# Altium footprint library IC.PcbLib: 204 footprints (part 11 of 13)
Each footprint in its own frame and in the unit in brackets; x right, y up, seen from the top. Pads: shape width x height; smd on the part's side, far side on the other; paste and mask are expansions set on the pad; w line width, h text height; cw(c..) or ccw(c..) is an arc to the next point about the centre after c.
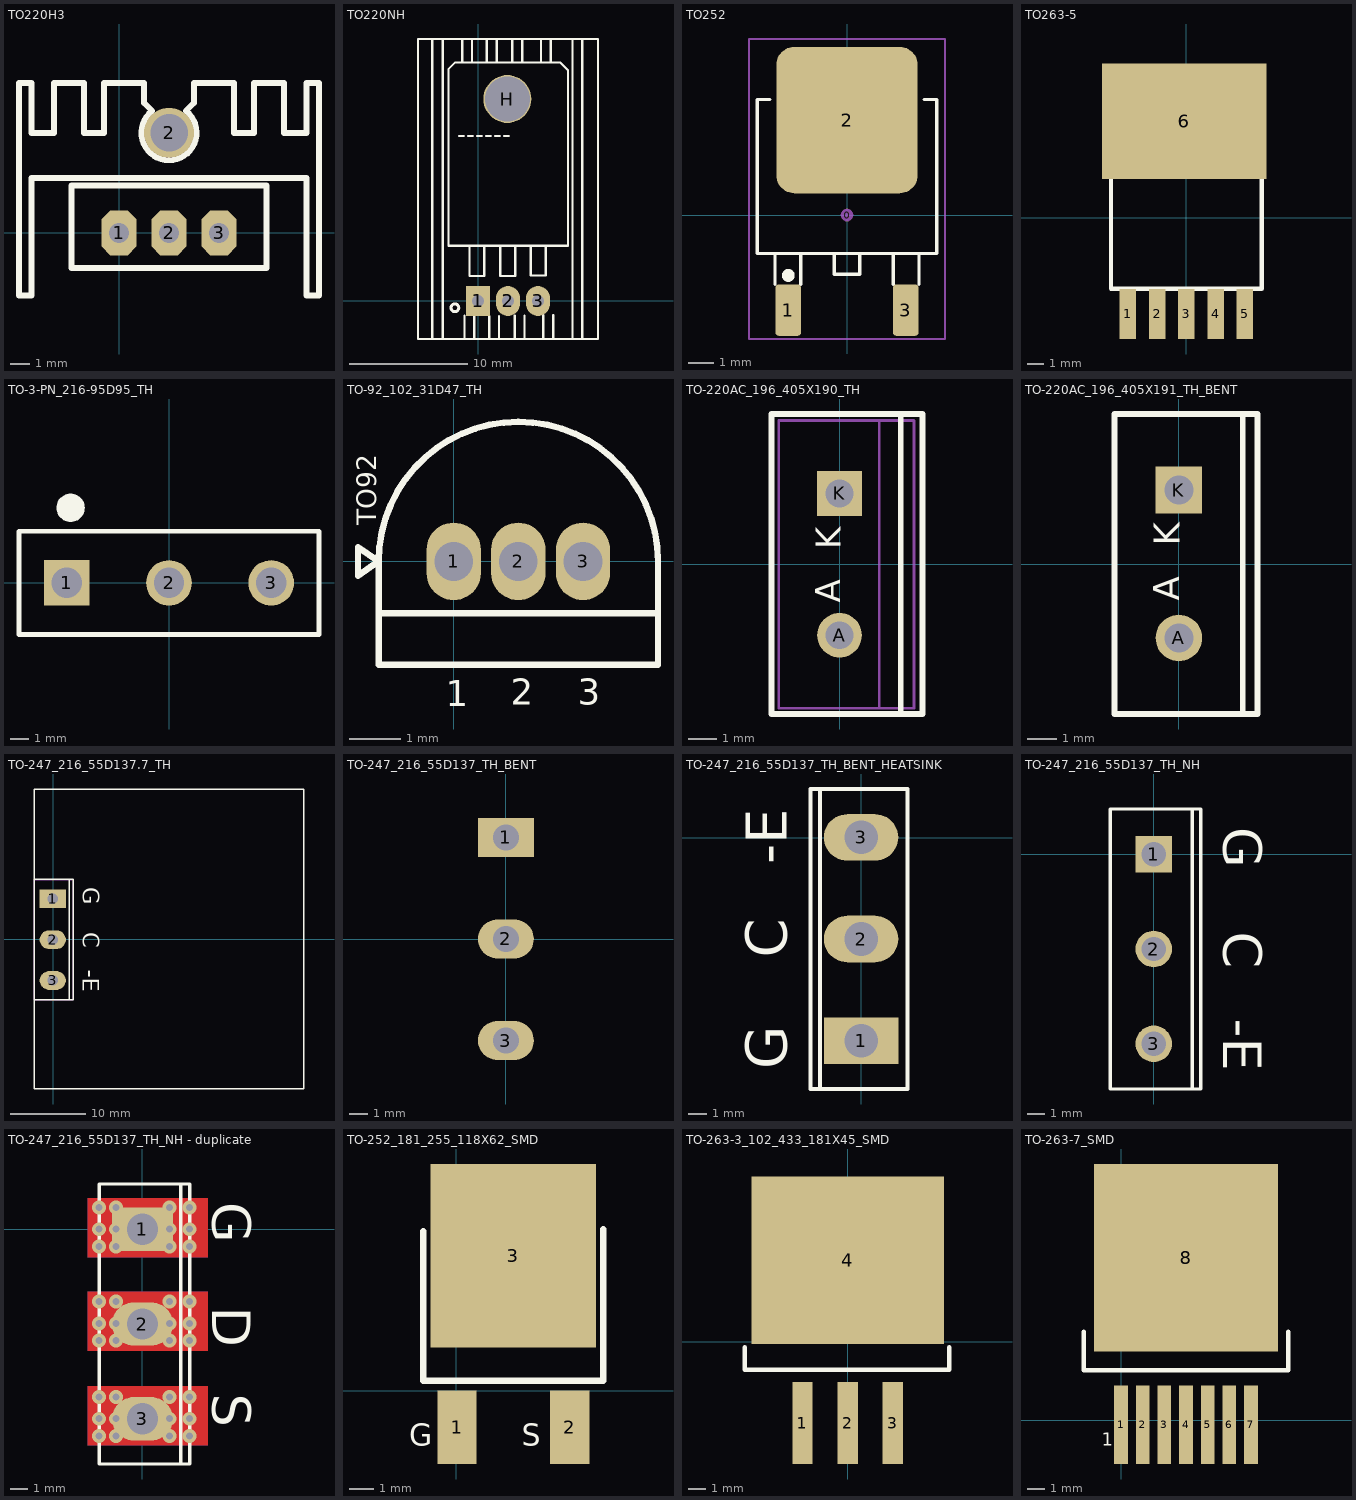
[diagram p10: the footprints below, top view; thin cyan lines are the x and y axes]

## TO220H3 [mil] "TO-220 1-2-3"
pads (4):
  oct 70x90 hole 40: 1(0,0) 2(100,0) 3(200,0)
  round 100 hole 75: 2(100,200)
Top Overlay:
  lines w12: 66,244 50,260 50,300 -30,300 -30,200 -70,200 -70,300 -130,300 -130,200 -175,200 -175,300 -200,300 -200,-125 -175,-125 -175,110 375,110 375,-125 400,-125 400,300 375,300 375,200 330,200 330,300 270,300 270,200 230,200 230,300 150,300 150,260 133.59,243.59 ; 66.37,243.52 ccw(c100,200) 133.77,243.41 ; -95,-70 -95,95 295,95 295,-70 -95,-70
3D body "SW3dPS-heatsink TO126.STEP": height 984.25, standoff -149.61, extent -189.97,-102.25 391.97,323
3D body "User Library-TO-220-1.STEP": height 322.83, standoff -810.24, extent -96.88,-76.17 292.88,101

## TO220NH [mil] "TO-220 - 1-2-3"
height 200
pads (4):
  rect 80x100 hole 39: 1(0,0)
  oval 80x100 hole 39: 2(100,0) 3(200,0)
  round 160 hole 150: H(98,673)
Top Overlay:
  circle w10: c-77.03,-23 r12.97
  lines w7: -99,549 -99,772 -77,794 275,794 300,769 300,730 ; -99,552 -99,184 300,184 300,553 ; -29,178 -29,83 21,83 21,180 20,181 ; 74,178 74,83 124,83 124,180 123,181 ; 176,180 176,85 226,85 226,182 225,183 ; 300,552 300,733
  lines w8: -152,-127 -152,873 ; -117,-127 -117,873 ; -53,796 -53.01,869.97 ; -45,-124 -45.01,-50.03 ; -20,796 -20.01,869.97 ; -12,-124 -12.01,-50.03 ; 29,795 28.99,868.97 ; 37,-125 36.99,-51.03 ; 62,795 61.99,868.97 ; 70,-125 69.99,-51.03 ; 114,796 113.99,869.97 ; 122,-124 121.99,-50.03 ; 147,796 146.99,869.97 ; 155,-124 154.99,-50.03 ; 210,798 209.99,871.97 ; 218,-122 217.99,-48.03 ; 243,798 242.99,871.97 ; 251,-122 250.99,-48.03 ; 315,-127 315,873 ; 348,-127 348,873 ; -200,-127 -200,873 400,873 400,-127 -200,-127
  text "------" at -69,527 h60
3D body "SW3DPS-TO-220-DEFAULT.STEP": height 165.35, standoff -118.11, extent -100,-3.66 300,763.66

## TO252 [mm] "TO252"
pads (4):
  round 0.5 on Mech15: 0(0,0)
  rrect25% 1x2 smd: 1(-2.285,-3.7) 3(2.285,-3.7)
  rrect25% 5.5x5.7 smd: 2(0,3.7)
Top Overlay:
  circle w0.25: c-2.285,-2.35 r0.125
  lines w0.127: -3,4.5 -3.5,4.5 -3.5,-1.5 3.5,-1.5 3.5,4.5 3,4.5 ; -2.8,-2.7 -2.8,-1.5 -1.8,-1.5 -1.8,-2.7 ; 1.8,-2.7 1.8,-1.5 2.8,-1.5 2.8,-2.7 ; -0.5,-2.3 -0.5,-1.5 0.5,-1.5 0.5,-2.3 -0.5,-2.3
Mechanical 15:
  lines w0.076: -3.81,-4.826 -3.81,6.858 3.81,6.858 3.81,-4.826 -3.81,-4.826
3D body "DPAK.stp": height 2.31, standoff 0, extent -3.3,-3.951 3.3,5.762

## TO263-5 [mil] "TO263-5"
pads (6):
  rect 39.37x120 smd: 1(-140,-230) 2(-70,-230) 3(0,-230) 4(70,-230) 5(140,-230)
  rect 393.7x275.59 smd: 6(-5,230)
Top Overlay:
  lines w10: -160,170 -160,240 -140,260 140,260 160,240 160,170 ; -180,-170 180,-170 180,170 -180,170 -180,-170
3D body "TO-263-5.STEP": height 180.12, standoff 0.6, extent -200,-241.79 200,309.98

## TO-3-PN_216-95D95_TH [mm] "CASE: TO-3"
height 23.8
pads (4):
  rect 2.43x2.43 hole 1.62: 1(-5.45,0)
  round 2.43 hole 1.62: 2(0,0) 3(5.45,0)
  round 1.524 on Top Overlay: ""(-5.25,4)
Top Overlay:
  lines w0.254: -8,-2.75 8,-2.75 8,2.75 -8,2.75 -8,-2.75
3D body "FGA60N65SMD.stp": height 23.4, standoff -37.4, extent -7.8,-2.5 7.8,2.5

## TO-92_102_31D47_TH [mil] "CASE: TH"
height 342.52
pads (3):
  oval 42x60 hole 30 mask+3: 1(0,0) 2(50,0) 3(100,0)
Top Overlay:
  lines w5: -58,-40 158,-40 ; -58,0 cw(c50,0) 158,0 158,-80 -58,-80 -58,0 ; -58,0 -74,-11 -74,11 -58,0
  text "1" at -6,-112 h20
  text "2" at 44,-111 h20
  text "3" at 96,-111 h20
  text "TO92" at -60,28 h15
3D body "TO-92-2.STEP": height 418.5, standoff -140.55, extent -44.37,-63.73 144.39,93.75

## TO-220AC_196_405X190_TH [mm] "FM, 2-Leads, Body 10.3x4.85mm, Pitch 5.08mm"
height 19.05
pads (2):
  round 1.6 hole 1: A(0,-2.54)
  rect 1.6x1.6 hole 1: K(0,2.54)
Top Overlay:
  lines w0.2: 2.184,-5.258 2.195,5.334 ; -2.438,-5.359 2.972,-5.359 2.972,5.385 -2.438,5.385 -2.438,-5.359
  text "A" at 0.33,-1.372 h1.52
  text "K" at 0.356,0.533 h1.52
Mechanical 8:
  lines w0.1: 1.42,-5.15 1.42,5.15 ; -2.18,-5.15 2.67,-5.15 2.67,5.15 -2.18,5.15 -2.18,-5.15
3D body: height 14.33, standoff 12.8, extent 1.42,-4.975 2.67,4.975
3D body: height 19.05, standoff 18.18, extent 1.42,-4.975 2.67,4.975
3D body: height 14.37, standoff 14.33, extent 1.42,-4.975 2.67,-0.376
3D body: height 18.18, standoff 18.14, extent 1.42,-4.975 2.67,-0.376
3D body: height 14.48, standoff 14.36, extent 1.42,-4.975 2.67,-0.737
3D body: height 18.14, standoff 18.03, extent 1.42,-4.975 2.67,-0.737
3D body: height 2.79, standoff 0, extent -0.25,1.875 0.25,3.205
3D body: height 14.37, standoff 14.33, extent 1.42,0.376 2.67,4.975
3D body: height 18.18, standoff 18.14, extent 1.42,0.376 2.67,4.975
3D body: height 14.48, standoff 14.36, extent 1.42,0.737 2.67,4.975
3D body: height 18.14, standoff 18.03, extent 1.42,0.737 2.67,4.975
3D body: height 14.65, standoff 14.47, extent 1.42,1.069 2.67,4.975
3D body: height 18.03, standoff 17.85, extent 1.42,1.069 2.67,4.975
3D body: height 14.89, standoff 14.65, extent 1.42,1.361 2.67,4.975
3D body: height 17.86, standoff 17.61, extent 1.42,1.361 2.67,4.975
3D body: height 15.19, standoff 14.89, extent 1.42,1.601 2.67,4.975
3D body: height 17.62, standoff 17.32, extent 1.42,1.601 2.67,4.975
3D body: height 15.52, standoff 15.18, extent 1.42,1.778 2.67,4.975
3D body: height 17.32, standoff 16.99, extent 1.42,1.778 2.67,4.975
3D body: height 15.88, standoff 15.51, extent 1.42,1.888 2.67,4.975
3D body: height 16.99, standoff 16.63, extent 1.42,1.888 2.67,4.975
3D body: height 16.25, standoff 15.87, extent 1.42,1.925 2.67,4.975
3D body: height 16.63, standoff 16.25, extent 1.42,1.925 2.67,4.975
3D body: height 2.79, standoff 0, extent -0.25,-3.205 0.25,-1.875
3D body: height 14.65, standoff 14.47, extent 1.42,-4.975 2.67,-1.069
3D body: height 18.03, standoff 17.85, extent 1.42,-4.975 2.67,-1.069
3D body: height 14.89, standoff 14.65, extent 1.42,-4.975 2.67,-1.361
3D body: height 17.86, standoff 17.61, extent 1.42,-4.975 2.67,-1.361
3D body: height 15.19, standoff 14.89, extent 1.42,-4.975 2.67,-1.601
3D body: height 17.62, standoff 17.32, extent 1.42,-4.975 2.67,-1.601
3D body: height 15.52, standoff 15.18, extent 1.42,-4.975 2.67,-1.778
3D body: height 17.32, standoff 16.99, extent 1.42,-4.975 2.67,-1.778
3D body: height 15.88, standoff 15.51, extent 1.42,-4.975 2.67,-1.888
3D body: height 16.99, standoff 16.63, extent 1.42,-4.975 2.67,-1.888
3D body: height 16.25, standoff 15.87, extent 1.42,-4.975 2.67,-1.925
3D body: height 16.63, standoff 16.25, extent 1.42,-4.975 2.67,-1.925
3D body: height 0, standoff -1.6, extent -0.25,2.155 0.25,2.925
3D body: height 0, standoff -1.6, extent -0.25,-2.925 0.25,-2.155
3D body: height 12.8, standoff 2.79, extent -2.18,-5.15 2.67,5.15

## TO-220AC_196_405X191_TH_BENT [mm]
pads (2):
  round 1.6 hole 1: A(0,-2.54)
  rect 1.6x1.6 hole 1: K(0,2.54)
Top Overlay:
  lines w0.2: 2.195,-5.15 2.195,5.15 ; -2.205,-5.15 2.695,-5.15 2.695,5.15 -2.205,5.15 -2.205,-5.15
  text "K" at 0.33,0.635 h1.52
  text "A" at 0.305,-1.27 h1.52
3D body "User Library-TO220 L.step": height 7.2, standoff -0.3, extent -0.052,-4.9 19.652,5.1

## TO-247_216_55D137.7_TH [mm]
pads (3):
  rect 3.5x2.5 hole 1.4: 1(-0.076,5.425)
  oval 3.5x2.5 hole 1.4: 2(-0.076,-0.025) 3(-0.076,-5.475)
Top Overlay:
  lines w0.178: 2.134,-8.075 2.134,8.025 ; 33.426,20.091 -2.566,20.091 -2.566,8.025 ; 33.452,20.091 33.452,-19.964 -2.565,-19.964 -2.565,-8.076 -2.566,-8.075 ; -2.566,-8.075 -2.566,8.025 ; -2.566,-8.075 2.634,-8.075 2.634,8.025 -2.566,8.025
  text "G" at 3.924,6.975 h2.2
  text "C" at 3.924,0.975 h2.2
  text "-E" at 3.924,-4.025 h2.2
Mechanical 13:
  lines w0.1: 2.634,-8.05 2.634,8 ; 2.634,-8.05 -2.566,-8.05 -2.566,8 2.634,8 ; 2.634,-8.05 2.634,8
3D body "tony_assembly_14_asm.stp": height 52, standoff -2.2, extent -2.591,-19.949 33.57,20.051

## TO-247_216_55D137_TH_BENT [mm] "IGBT"
height 12
pads (3):
  rect 3x2.1 hole 1.4: 1(0,5.45)
  oval 3x2.1 hole 1.4: 2(0,0) 3(0,-5.45)
Bottom Overlay:
  lines w0.2: 2.21,-8.05 2.21,8.05 ; -2.49,-8.05 -2.49,8.05 2.71,8.05 2.71,-8.05 -2.49,-8.05
  text "E" at -5.5,-8 h2.2
  text "G" at -5.5,5 h2.2
  text "C" at -5.5,-0.5 h2.2
3D body "IGBT.STEP": height -5, standoff -9.9, extent 3.9,-7.75 23.9,7.75

## TO-247_216_55D137_TH_BENT_HEATSINK [mm] "CASE: TO-247"
height 30
pads (3):
  rect 4x2.5 hole 1.8: 1(0,-10.871)
  oval 4x2.5 hole 1.8: 2(0,-5.421) 3(0,0.029)
Top Overlay:
  lines w0.2: -2.21,-13.471 -2.21,2.629 ; -2.71,-13.471 -2.71,2.629 2.49,2.629 2.49,-13.471 -2.71,-13.471
  text "G" at -4,-12.421 h2.2
  text "C" at -4,-6.421 h2.2
  text "-E" at -4,-1.421 h2.2
3D body "IGBT and Heatsink.STEP": height 18.01, standoff -3.99, extent -7.173,-25.461 32.827,14.539

## TO-247_216_55D137_TH_NH [mm]
pads (3):
  rect 2.1x2.1 hole 1.4: 1(0,0)
  round 2.1 hole 1.4: 2(0,-5.45) 3(0,-10.9)
Top Overlay:
  lines w0.2: 2.21,-13.5 2.21,2.6 ; -2.49,-13.5 2.71,-13.5 2.71,2.6 -2.49,2.6 -2.49,-13.5
  text "-E" at 4,-9.45 h2.2
  text "C" at 4,-4.45 h2.2
  text "G" at 4,1.55 h2.2
3D body: height 25.57, standoff 4.17, extent -2.49,-13.475 2.71,2.575

## TO-247_216_55D137_TH_NH - duplicate [mm] "Power Mosfet"
height 24.78
pads (3):
  rect 3.5x2.5 hole 1.8: 1(0,0)
  oval 3.5x2.5 hole 1.8: 2(0,-5.45) 3(0,-10.9)
via -2.489,1.245 diameter 0.8 hole 0.4
via -2.49,-0.991 diameter 0.8 hole 0.4
via -2.489,0 diameter 0.8 hole 0.4
via -1.524,1.245 diameter 0.8 hole 0.4
via -1.524,-0.991 diameter 0.8 hole 0.4
via -1.524,-0.991 diameter 0.8 hole 0.4
via -1.524,0 diameter 0.8 hole 0.4
via 1.549,-0.991 diameter 0.8 hole 0.4
via 1.549,0 diameter 0.8 hole 0.4
via 1.549,1.245 diameter 0.8 hole 0.4
via 2.71,1.245 diameter 0.8 hole 0.4
via 2.71,0 diameter 0.8 hole 0.4
via 2.71,-0.991 diameter 0.8 hole 0.4
via 2.711,-6.401 diameter 0.8 hole 0.4
via 2.711,-5.41 diameter 0.8 hole 0.4
via 2.711,-4.166 diameter 0.8 hole 0.4
via 1.55,-4.166 diameter 0.8 hole 0.4
via 1.55,-5.41 diameter 0.8 hole 0.4
via 1.55,-6.401 diameter 0.8 hole 0.4
via -1.523,-5.41 diameter 0.8 hole 0.4
via -1.523,-6.401 diameter 0.8 hole 0.4
via -1.523,-4.166 diameter 0.8 hole 0.4
via -2.488,-5.41 diameter 0.8 hole 0.4
via -2.489,-6.401 diameter 0.8 hole 0.4
via -2.488,-4.166 diameter 0.8 hole 0.4
via 2.71,-11.887 diameter 0.8 hole 0.4
via 2.71,-10.897 diameter 0.8 hole 0.4
via 2.71,-9.652 diameter 0.8 hole 0.4
via 1.549,-9.652 diameter 0.8 hole 0.4
via 1.549,-10.897 diameter 0.8 hole 0.4
via 1.549,-11.887 diameter 0.8 hole 0.4
via -1.524,-10.897 diameter 0.8 hole 0.4
via -1.524,-11.887 diameter 0.8 hole 0.4
via -1.524,-9.652 diameter 0.8 hole 0.4
via -2.489,-10.897 diameter 0.8 hole 0.4
via -2.49,-11.887 diameter 0.8 hole 0.4
via -2.489,-9.652 diameter 0.8 hole 0.4
Top Layer:
  rectangle: -3.15,-1.626 3.759,1.803
  rectangle: -3.15,-7.01 3.759,-3.581
  rectangle: -3.15,-12.446 3.759,-9.017
Bottom Layer:
  region: 3.759,1.803 -3.15,1.803 -3.15,-1.626 3.759,-1.626
  region: 3.759,-3.581 -3.15,-3.581 -3.15,-7.01 3.759,-7.01
  region: 3.759,-9.017 -3.15,-9.017 -3.15,-12.446 3.759,-12.446
Top Overlay:
  lines w0.2: 2.21,-13.5 2.21,2.6 ; -2.49,-13.5 -2.49,2.6 2.71,2.6 2.71,-13.5 -2.49,-13.5
  text "G" at 4,1.55 h2.2
  text "D" at 4,-4.45 h2.2
  text "S" at 4,-9.45 h2.2
3D body "IGBT and Heatsink.STEP": height 18.01, standoff -3.99, extent -7.173,-25.49 32.827,14.51

## TO-252_181_255_118X62_SMD [mm] "CASE: TO-252"
height 2.4
pads (3):
  rect 1.6x3 smd: 1(0.037,-1.484) 2(4.637,-1.484)
  rect 6.75x7.5 smd: 3(2.337,5.512)
Top Overlay:
  lines w0.254: -1.346,6.516 -1.346,0.416 6,0.416 6,6.6
  text "S" at 2.667,-2.54 h1.52
  text "G" at -1.905,-2.54 h1.52
3D body "CircuitWorks-TO-252.step": height 2.31, standoff 0.01, extent -0.877,-1.282 5.703,8.418

## TO-263-3_102_433_181X45_SMD [mm] "CASE: TO-263"
height 4.57
pads (4):
  rect 1.15x4.6 smd: 1(-2.54,-4.575) 2(0,-4.575) 3(2.54,-4.575)
  rect 10.8x9.4 smd: 4(0,4.575)
Top Overlay:
  lines w0.254: -5.79,-0.325 -5.79,-1.575 5.71,-1.575 5.71,-0.325
3D body "69246.stp": height 4.51, standoff 0.01, extent -5.05,-6.469 5.05,8.921

## TO-263-7_SMD [mm] "CASE: TO-263"
height 4.7
pads (8):
  rect 0.8x4.6 smd: 1(0,-0.254) 2(1.27,-0.254) 3(2.54,-0.254) 4(3.81,-0.254) 5(5.08,-0.254) 6(6.35,-0.254) 7(7.62,-0.254)
  rect 10.8x11 smd: 8(3.81,9.531)
Top Overlay:
  lines w0.254: -2.19,5.2 -2.19,2.95 9.81,2.95 9.81,5.2
  text "1" at -1.143,-1.491 h0.76
3D body "User Library-TO263-7-1.STEP": height 4.81, standoff 0.01, extent -1.241,-1.781 8.759,13.889